# Altium schematic symbol library AN54LM-P20_SCH-260723.SchLib: 1 symbol
Pins are listed as number, name and electrical type; pins without a type are passive.

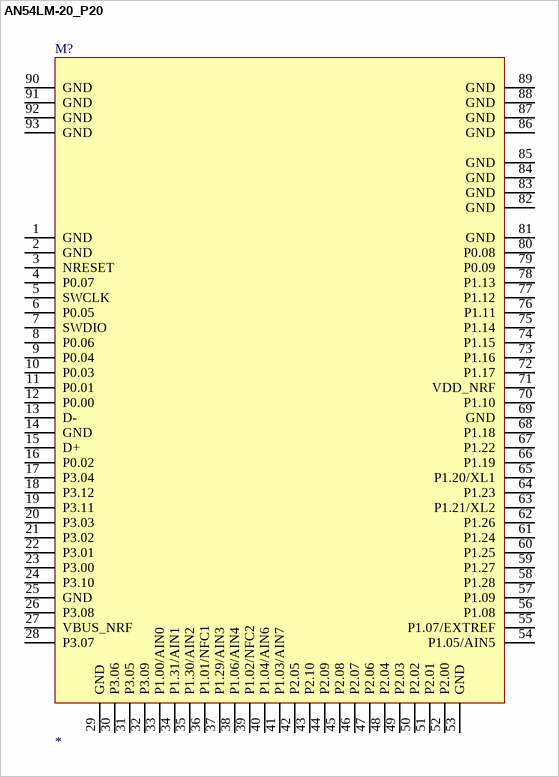
[diagram p0: symbol AN54LM-20_P20]

## AN54LM-20_P20
designator M?
footprint AN54LM-20_P20
pins: 1 GND, 2 GND, 3 NRESET, 4 P0.07, 5 SWCLK, 6 P0.05, 7 SWDIO, 8 P0.06, 9 P0.04, 10 P0.03, 11 P0.01, 12 P0.00, 13 D-, 14 GND, 15 D+, 16 P0.02, 17 P3.04, 18 P3.12, 19 P3.11, 20 P3.03, 21 P3.02, 22 P3.01, 23 P3.00, 24 P3.10, 25 GND, 26 P3.08, 27 VBUS_NRF, 28 P3.07, 29 GND, 30 P3.06, 31 P3.05, 32 P3.09, 33 P1.00/AIN0, 34 P1.31/AIN1, 35 P1.30/AIN2, 36 P1.01/NFC1, 37 P1.29/AIN3, 38 P1.06/AIN4, 39 P1.02/NFC2, 40 P1.04/AIN6, 41 P1.03/AIN7, 42 P2.05, 43 P2.10, 44 P2.09, 45 P2.08, 46 P2.07, 47 P2.06, 48 P2.04, 49 P2.03, 50 P2.02, 51 P2.01, 52 P2.00, 53 GND, 54 P1.05/AIN5, 55 P1.07/EXTREF, 56 P1.08, 57 P1.09, 58 P1.28, 59 P1.27, 60 P1.25, 61 P1.24, 62 P1.26, 63 P1.21/XL2, 64 P1.23, 65 P1.20/XL1, 66 P1.19, 67 P1.22, 68 P1.18, 69 GND, 70 P1.10, 71 VDD_NRF, 72 P1.17, 73 P1.16, 74 P1.15, 75 P1.14, 76 P1.11, 77 P1.12, 78 P1.13, 79 P0.09, 80 P0.08, 81 GND, 82 GND, 83 GND, 84 GND, 85 GND, 86 GND, 87 GND, 88 GND, 89 GND, 90 GND, 91 GND, 92 GND, 93 GND